# Altium footprint library RF Module.PcbLib: 29 footprints (part 1 of 2)
Each footprint in its own frame and in the unit in brackets; x right, y up, seen from the top. Pads: shape width x height; smd on the part's side, far side on the other; paste and mask are expansions set on the pad; w line width, h text height; cw(c..) or ccw(c..) is an arc to the next point about the centre after c.
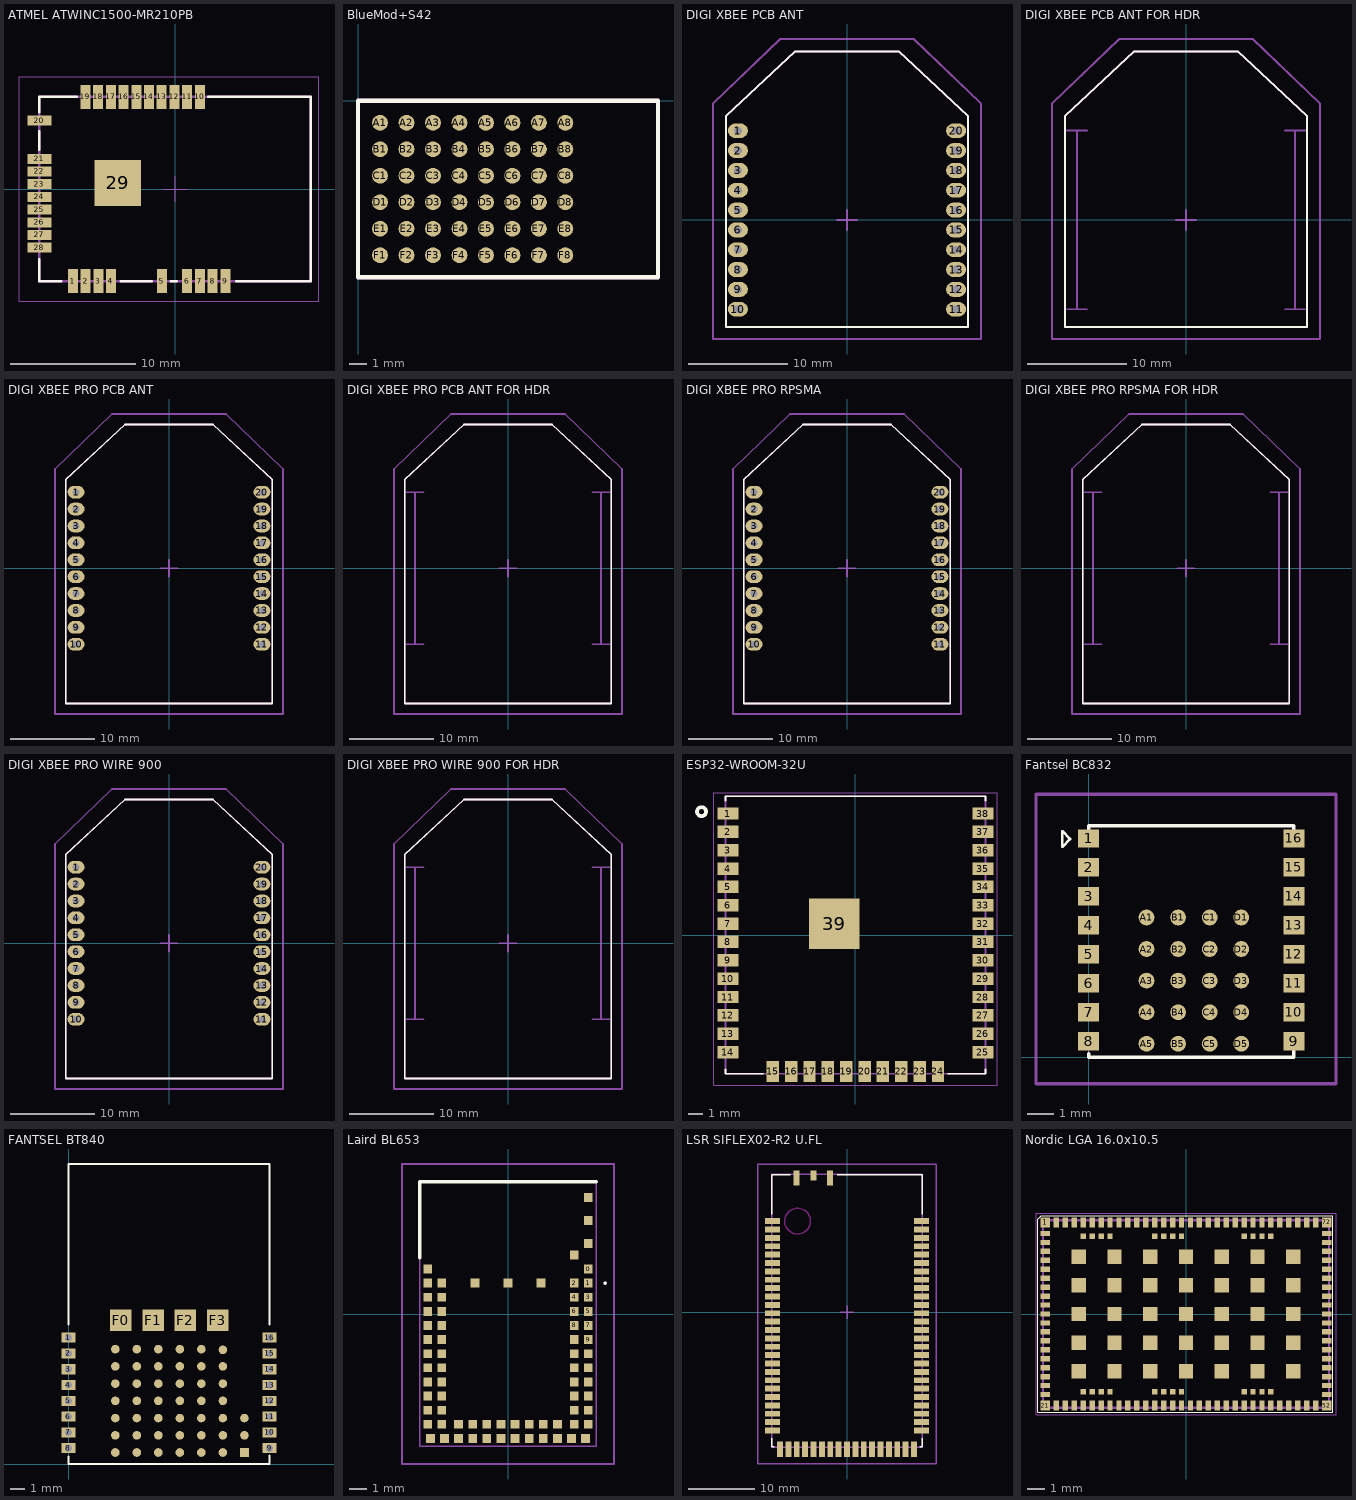
[diagram p0: the footprints below, top view; thin cyan lines are the x and y axes]

## ATMEL ATWINC1500-MR210PB [mm]
height 2.2
pads (29):
  rect 0.8x1.9 smd: 1(-8.19,-7.365) 2(-7.174,-7.365) 3(-6.158,-7.365) 4(-5.142,-7.365) 5(-1.078,-7.365) 6(0.954,-7.365) 7(1.97,-7.365) 8(2.986,-7.365) 9(4.002,-7.365) 10(1.964,7.365) 11(0.948,7.365) 12(-0.068,7.365) 13(-1.084,7.365) 14(-2.1,7.365) 15(-3.116,7.365) 16(-4.132,7.365) 17(-5.148,7.365) 18(-6.164,7.365) 19(-7.18,7.365)
  rect 1.9x0.8 smd: 20(-10.86,5.465) 21(-10.86,2.417) 22(-10.86,1.401) 23(-10.86,0.385) 24(-10.86,-0.631) 25(-10.86,-1.647) 26(-10.86,-2.663) 27(-10.86,-3.679) 28(-10.86,-4.695)
  rect 3.7x3.7 smd: 29(-4.59,0.485)
Top Overlay:
  lines w0.2: -10.86,-5.615 -10.86,-7.365 -9.11,-7.365 ; -10.86,3.135 -10.86,4.635 ; -10.86,6.135 -10.86,7.365 -7.86,7.365 ; -4.36,-7.365 -1.86,-7.365 ; -0.36,-7.365 0.14,-7.365 ; 2.64,7.365 10.86,7.365 10.86,-7.365 4.89,-7.365
Board:
  lines w0.2: -10.86,-7.365 -10.86,7.365 10.86,7.365 10.86,-7.365 -10.86,-7.365
Top Courtyard:
  lines w0.1: -1,0 1,0 ; 0,-1 0,1 ; -12.5,-9 11.5,-9 11.5,9 -12.5,9 -12.5,-9
3D body "ATWINC1500-MR210PB.STEP": height 2.2, standoff 0, extent -10.86,-7.365 10.86,7.365

## BlueMod+S42 [mm] "Bluetooth 4.2 Low Energy plug-and-play module"
height 2.8
pads (48):
  round 0.9 smd: A1(1.25,-1.25) A2(2.75,-1.25) A3(4.25,-1.25) A4(5.75,-1.25) A5(7.25,-1.25) A6(8.75,-1.25) A7(10.25,-1.25) A8(11.75,-1.25) B1(1.25,-2.75) B2(2.75,-2.75) B3(4.25,-2.75) B4(5.75,-2.75) B5(7.25,-2.75) B6(8.75,-2.75) B7(10.25,-2.75) B8(11.75,-2.75) C1(1.25,-4.25) C2(2.75,-4.25) C3(4.25,-4.25) C4(5.75,-4.25) C5(7.25,-4.25) C6(8.75,-4.25) C7(10.25,-4.25) C8(11.75,-4.25) D1(1.25,-5.75) D2(2.75,-5.75) D3(4.25,-5.75) D4(5.75,-5.75) D5(7.25,-5.75) D6(8.75,-5.75) D7(10.25,-5.75) D8(11.75,-5.75) E1(1.25,-7.25) E2(2.75,-7.25) E3(4.25,-7.25) E4(5.75,-7.25) E5(7.25,-7.25) E6(8.75,-7.25) E7(10.25,-7.25) E8(11.75,-7.25) F1(1.25,-8.75) F2(2.75,-8.75) F3(4.25,-8.75) F4(5.75,-8.75) F5(7.25,-8.75) F6(8.75,-8.75) F7(10.25,-8.75) F8(11.75,-8.75)
Top Overlay:
  lines w0.254: 0,-10 17,-10 17,0 0,0 0,-10
Board:
  lines w0.254: 0,-10 17,-10 17,0 0,0 0,-10
Notes (Assembly Notes):
  lines w0.254: 0,-10 17,-10 17,0 0,0 0,-10
3D body: height 0.3, standoff 0, extent 13.525,-3.375 14.15,-3.125
3D body: height 0.3, standoff 0, extent 13.25,-3.8 13.5,-3.125
3D body: height 1, standoff 0, extent 15.6,-9.4 16.6,-5.4
3D body: height 2.6, standoff 0, extent 0,-10 13.25,0

## DIGI XBEE PCB ANT [mm]
height 4
pads (20):
  oval 2x1.5 hole 0.8: 1(-11,9) 2(-11,7) 3(-11,5) 4(-11,3) 5(-11,1) 6(-11,-1) 7(-11,-3) 8(-11,-5) 9(-11,-7) 10(-11,-9) 11(11,-9) 12(11,-7) 13(11,-5) 14(11,-3) 15(11,-1) 16(11,1) 17(11,3) 18(11,5) 19(11,7) 20(11,9)
Top Overlay:
  lines w0.2: -12.2,-10.8 0,-10.8 12.2,-10.8 12.2,10.5 5.2,17 0,17 -5.2,17 -12.2,10.5 -12.2,-10.8
Board:
  lines w0.2: -12.2,-10.8 -12.2,10.5 -5.2,17 0,17 5.2,17 12.2,10.5 12.2,-10.8 0,-10.8 -12.2,-10.8
Top Courtyard:
  lines w0.2: -1,0 1,0 ; 0,-1 0,1 ; -13.5,-12 -13.5,11.75 -6.75,18.25 6.75,18.25 13.5,11.75 13.5,-12 -13.5,-12
3D body "XBee PCB Antenna.STEP": height 3.58, standoff -4.17, extent -12.192,-10.8 12.192,16.97

## DIGI XBEE PCB ANT FOR HDR [mm]
height 8.4
Top Overlay:
  lines w0.2: -12.2,-10.8 -12.2,10.5 -5.2,17 0,17 5.2,17 12.2,10.5 12.2,-10.8 0,-10.8 -12.2,-10.8
Board:
  lines w0.2: -12,-9 -11,-9 ; -12,9 -11,9 ; -10,-9 -11,-9 ; -10,9 -11,9 ; 10,-9 11,-9 ; 10,9 11,9 ; 12,-9 11,-9 ; 12,9 11,9 ; -11,-9 -11,9 ; 11,-9 11,9 ; -12.2,-10.8 0,-10.8 12.2,-10.8 12.2,10.5 5.2,17 0,17 -5.2,17 -12.2,10.5 -12.2,-10.8
Top Courtyard:
  lines w0.2: -1,0 1,0 ; 0,-1 0,1 ; -13.5,-12 13.5,-12 13.5,11.75 6.75,18.25 -6.75,18.25 -13.5,11.75 -13.5,-12
3D body "XBee PCB Antenna.STEP": height 7.98, standoff 0.23, extent -12.192,-10.8 12.192,16.97

## DIGI XBEE PRO PCB ANT [mm]
height 4
pads (20):
  oval 2x1.5 hole 0.8: 1(-11,9) 2(-11,7) 3(-11,5) 4(-11,3) 5(-11,1) 6(-11,-1) 7(-11,-3) 8(-11,-5) 9(-11,-7) 10(-11,-9) 11(11,-9) 12(11,-7) 13(11,-5) 14(11,-3) 15(11,-1) 16(11,1) 17(11,3) 18(11,5) 19(11,7) 20(11,9)
Top Overlay:
  lines w0.2: -12.2,-16 -12.2,10.5 -5.2,17 0,17 5.2,17 12.2,10.5 12.2,-16 -12.2,-16
Board:
  lines w0.2: -12.2,-16 12.2,-16 12.2,10.5 5.2,17 0,17 -5.2,17 -12.2,10.5 -12.2,-16
Top Courtyard:
  lines w0.2: -1,0 1,0 ; 0,-1 0,1 ; -13.5,-17.25 13.5,-17.25 13.5,11.75 6.75,18.25 -6.75,18.25 -13.5,11.75 -13.5,-17.25
3D body "XBee Pro PCB Antenna.STEP": height 3.58, standoff -4.17, extent -12.192,-15.97 12.192,16.97

## DIGI XBEE PRO PCB ANT FOR HDR [mm]
height 4
Top Overlay:
  lines w0.2: -12.2,-16 -12.2,10.5 -5.2,17 0,17 5.2,17 12.2,10.5 12.2,-16 -12.2,-16
Board:
  lines w0.2: -12,-9 -11,-9 ; -12,9 -11,9 ; -10,-9 -11,-9 ; -10,9 -11,9 ; 10,-9 11,-9 ; 10,9 11,9 ; 12,-9 11,-9 ; 12,9 11,9 ; -11,-9 -11,9 ; 11,-9 11,9 ; -12.2,-16 12.2,-16 12.2,10.5 5.2,17 0,17 -5.2,17 -12.2,10.5 -12.2,-16
Top Courtyard:
  lines w0.2: -1,0 1,0 ; 0,-1 0,1 ; -13.5,-17.25 13.5,-17.25 13.5,11.75 6.75,18.25 -6.75,18.25 -13.5,11.75 -13.5,-17.25
3D body "XBee Pro PCB Antenna.STEP": height 3.58, standoff -4.17, extent -12.192,-15.97 12.192,16.97

## DIGI XBEE PRO RPSMA [mm]
height 4
pads (20):
  oval 2x1.5 hole 0.8: 1(-11,9) 2(-11,7) 3(-11,5) 4(-11,3) 5(-11,1) 6(-11,-1) 7(-11,-3) 8(-11,-5) 9(-11,-7) 10(-11,-9) 11(11,-9) 12(11,-7) 13(11,-5) 14(11,-3) 15(11,-1) 16(11,1) 17(11,3) 18(11,5) 19(11,7) 20(11,9)
Top Overlay:
  lines w0.2: -12.2,-16 -12.2,10.5 -5.2,17 0,17 5.2,17 12.2,10.5 12.2,-16 -12.2,-16
Board:
  lines w0.2: -12.2,-16 12.2,-16 12.2,10.5 5.2,17 0,17 -5.2,17 -12.2,10.5 -12.2,-16
Top Courtyard:
  lines w0.2: -1,0 1,0 ; 0,-1 0,1 ; -13.5,-17.25 13.5,-17.25 13.5,11.75 6.75,18.25 -6.75,18.25 -13.5,11.75 -13.5,-17.25
3D body "XBee Pro wRPSMA.STEP": height 7.27, standoff -4.17, extent -12.192,-15.97 12.192,29.97

## DIGI XBEE PRO RPSMA FOR HDR [mm]
height 12.4
Top Overlay:
  lines w0.2: -12.2,-16 12.2,-16 12.2,10.5 5.2,17 0,17 -5.2,17 -12.2,10.5 -12.2,-16
Board:
  lines w0.2: -12,-9 -11,-9 ; -12,9 -11,9 ; -10,-9 -11,-9 ; -10,9 -11,9 ; 10,-9 11,-9 ; 10,9 11,9 ; 12,-9 11,-9 ; 12,9 11,9 ; -11,-9 -11,9 ; 11,-9 11,9 ; -12.2,-16 -12.2,10.5 -5.2,17 0,17 5.2,17 12.2,10.5 12.2,-16 -12.2,-16
Top Courtyard:
  lines w0.2: -1,0 1,0 ; 0,-1 0,1 ; -13.5,-17.25 -13.5,11.75 -6.75,18.25 6.75,18.25 13.5,11.75 13.5,-17.25 -13.5,-17.25
3D body "XBee Pro wRPSMA.STEP": height 11.67, standoff 0.23, extent -12.192,-15.97 12.192,29.97

## DIGI XBEE PRO WIRE 900 [mm]
height 4
pads (20):
  oval 2x1.5 hole 0.8: 1(-11,9) 2(-11,7) 3(-11,5) 4(-11,3) 5(-11,1) 6(-11,-1) 7(-11,-3) 8(-11,-5) 9(-11,-7) 10(-11,-9) 11(11,-9) 12(11,-7) 13(11,-5) 14(11,-3) 15(11,-1) 16(11,1) 17(11,3) 18(11,5) 19(11,7) 20(11,9)
Top Overlay:
  lines w0.2: -12.2,-16 -12.2,10.5 -5.2,17 0,17 5.2,17 12.2,10.5 12.2,-16 -12.2,-16
Board:
  lines w0.2: -12.2,-16 12.2,-16 12.2,10.5 5.2,17 0,17 -5.2,17 -12.2,10.5 -12.2,-16
Top Courtyard:
  lines w0.2: -1,0 1,0 ; 0,-1 0,1 ; -13.5,-17.25 13.5,-17.25 13.5,11.75 6.75,18.25 -6.75,18.25 -13.5,11.75 -13.5,-17.25
3D body "XBee Pro Wire 900.STEP": height 77.88, standoff -4.17, extent -12.192,-15.97 12.192,16.97

## DIGI XBEE PRO WIRE 900 FOR HDR [mm]
height 8.4
Top Overlay:
  lines w0.2: -12.2,-16 12.2,-16 12.2,10.5 5.2,17 0,17 -5.2,17 -12.2,10.5 -12.2,-16
Board:
  lines w0.2: -12,-9 -11,-9 ; -12,9 -11,9 ; -10,-9 -11,-9 ; -10,9 -11,9 ; 10,-9 11,-9 ; 10,9 11,9 ; 12,-9 11,-9 ; 12,9 11,9 ; -11,-9 -11,9 ; 11,-9 11,9 ; -12.2,-16 -12.2,10.5 -5.2,17 0,17 5.2,17 12.2,10.5 12.2,-16 -12.2,-16
Top Courtyard:
  lines w0.2: -1,0 1,0 ; 0,-1 0,1 ; -13.5,-17.25 -13.5,11.75 -6.75,18.25 6.75,18.25 13.5,11.75 13.5,-17.25 -13.5,-17.25
3D body "XBee Pro Wire 900.STEP": height 82.28, standoff 0.23, extent -12.192,-15.97 12.192,16.97

## ESP32-WROOM-32U [mm]
pads (39):
  rect 1.45x0.86 smd: 1(-8.83,8.41) 2(-8.83,7.14) 3(-8.83,5.87) 4(-8.83,4.6) 5(-8.83,3.33) 6(-8.83,2.06) 7(-8.83,0.79) 8(-8.83,-0.48) 9(-8.83,-1.75) 10(-8.83,-3.02) 11(-8.83,-4.29) 12(-8.83,-5.56) 13(-8.83,-6.83) 14(-8.83,-8.1) 25(8.83,-8.1) 26(8.83,-6.83) 27(8.83,-5.56) 28(8.83,-4.29) 29(8.83,-3.02) 30(8.83,-1.75) 31(8.83,-0.48) 32(8.83,0.79) 33(8.83,2.06) 34(8.83,3.33) 35(8.83,4.6) 36(8.83,5.87) 37(8.83,7.14) 38(8.83,8.41)
  rect 0.86x1.45 smd: 15(-5.715,-9.43) 16(-4.445,-9.43) 17(-3.175,-9.43) 18(-1.905,-9.43) 19(-0.635,-9.43) 20(0.635,-9.43) 21(1.905,-9.43) 22(3.175,-9.43) 23(4.445,-9.43) 24(5.715,-9.43)
  rect 3.5x3.5 smd: 39(-1.46,0.77)
Top Overlay:
  circle w0.254: c-10.65,8.54 r0.312
  lines w0.127: -9,-9.3 -9,-9.6 -6.4,-9.6 ; -9,9.3 -9,9.6 9,9.6 9,9.3 ; 6.4,-9.6 9,-9.6 9,-9.3
Mechanical 4:
  lines w0.127: -9,-9.6 9,-9.6 ; -9,-9.6 -9,9.6 ; -9,-9.6 9,-9.6 ; -9,-9.6 -9,9.6 ; -9,9.6 9,9.6 ; -9,9.6 9,9.6 ; 9,-9.6 9,9.6 ; 9,-9.6 9,9.6
Bottom Courtyard:
  lines w0.05: -9.8,-10.4 9.8,-10.4 9.8,9.85 -9.8,9.85 -9.8,-10.4
3D body "ESP32-WROOM-32U.STEP": height 3.3, standoff 0, extent -9,-9.6 9,9.6

## Fantsel BC832 [mil] "Fantsel BLE Micro Module Ver 2.0"
height 55.12
pads (36):
  rect 31.5x27.56 smd: 1(0,327.56) 2(0,284.25) 3(0,240.94) 4(0,197.64) 5(0,154.33) 6(0,111.02) 7(0,67.72) 8(0,24.41) 9(307.09,24.41) 10(307.09,67.72) 11(307.09,111.02) 12(307.09,154.33) 13(307.09,197.64) 14(307.09,240.94) 15(307.09,284.25) 16(307.09,327.56)
  rrect100% 23.62x23.62 smd: A1(86.61,209.41) A2(86.61,162.17) A3(86.61,114.92) A4(86.61,67.68) A5(86.61,20.43) B1(133.86,209.41) B2(133.86,162.17) B3(133.86,114.92) B4(133.86,67.68) B5(133.86,20.43) C1(181.1,209.41) C2(181.1,162.17) C3(181.1,114.92) C4(181.1,67.68) C5(181.1,20.43) D1(228.35,209.41) D2(228.35,162.17) D3(228.35,114.92) D4(228.35,67.68) D5(228.35,20.43)
Top Overlay:
  lines w3.94: -27.56,326.77 -27.56,326.77 ; -27.56,326.77 -39.37,338.58 -39.37,314.96 -27.56,326.77
  lines w5: 0,5.91 0,0 307.09,0 307.09,10.55 ; 0,341.26 0,346.46 307.09,346.46 307.09,341.26
Top Courtyard:
  lines w0.04: 0,5.91 0,10
  lines w3.94: -78.74,-39.37 -78.74,393.7
  lines w5: -78.74,-39.37 370.08,-39.37 370.08,393.7 -78.74,393.7
3D body "FANTSEL BC832.stp": height 43.31, standoff -11.81, extent 7.88,0.01 314.96,346.46

## FANTSEL BT840 [mm]
pads (65):
  rect 1x0.7 / inner rect 0.7x0.7 / far side rect 1.5x0.7 hole 0.5: 1(-0.018,8.801) 2(-0.018,7.701) 3(-0.018,6.601) 4(-0.018,5.501) 5(-0.018,4.401) 6(-0.018,3.301) 7(-0.018,2.201) 8(-0.018,1.101) 9(13.992,1.101) 10(13.992,2.201) 11(13.992,3.301) 12(13.992,4.401) 13(13.992,5.501) 14(13.992,6.601) 15(13.992,7.701) 16(13.992,8.801)
  round 0.6 smd: A0(4.745,8.001) A1(4.745,6.801) A2(4.745,5.601) A3(4.745,4.401) A4(4.745,3.201) A5(4.745,2.001) A6(4.745,0.801) B0(6.245,8.001) B1(6.245,6.801) B2(6.245,5.601) B3(6.245,4.401) B4(6.245,3.201) B5(6.245,2.001) B6(6.245,0.801) C0(7.745,8.001) C1(7.745,6.801) C2(7.745,5.601) C3(7.745,4.401) C4(7.745,3.201) C5(7.745,2.001) C6(7.745,0.801) D0(9.245,8.001) D1(9.245,6.801) D2(9.245,5.601) D3(9.245,4.401) D4(9.245,3.201) D5(9.245,2.001) D6(9.245,0.801) E0(10.745,7.953) E1(10.745,6.801) E2(10.745,5.601) E3(10.745,4.401) E4(10.745,3.201) E5(10.745,2.001) E6(10.745,0.801) F4(12.245,3.201) F5(12.245,2.001) Z0(3.245,8.001) Z1(3.245,6.801) Z2(3.245,5.601) Z3(3.245,4.401) Z4(3.245,3.201) Z5(3.245,2.001) Z6(3.245,0.801)
  rect 1.5x1.5 smd: F0(3.625,10) F1(5.875,10) F2(8.125,10) F3(10.375,10)
  rect 0.6x0.6 smd: F6(12.245,0.801)
Top Overlay:
  lines w0.152: -0.01,0.004 -0.01,0.522 ; -0.008,0.001 13.992,0.001 ; -0.005,9.725 -0.005,20.901 13.992,20.901 13.992,9.725 ; 13.995,0.011 13.995,0.591
3D body "FANTSEL BT840.stp": height 2.02, standoff 0.02, extent 0,0 14,16

## Laird BL653 [mm] "Laird BL653"
pads (73):
  rect 0.5x0.5 smd: 0(4.55,2.55) 1(4.55,1.75) 2(3.75,1.75) 3(4.55,0.95) 4(3.75,0.95) 5(4.55,0.15) 6(3.75,0.15) 7(4.55,-0.65) 8(3.75,-0.65) 9(4.55,-1.45) 10(3.75,-1.45) 11(4.55,-2.25) 12(3.75,-2.25) 13(4.55,-3.05) 14(3.75,-3.05) 15(4.55,-3.85) 16(3.75,-3.85) 17(4.55,-4.65) 18(3.75,-4.65) 19(4.55,-5.45) 20(3.75,-5.45) 21(4.55,-6.25) 22(3.75,-6.25) 23(4.4,-7.05) 24(3.6,-7.05) 25(2.8,-7.05) 26(2.8,-6.25) 27(2,-7.05) 28(2,-6.25) 29(1.2,-7.05) 30(1.2,-6.25) 31(0.4,-7.05) 32(0.4,-6.25) 33(-0.4,-7.05) 34(-0.4,-6.25) 35(-1.2,-7.05) 36(-1.2,-6.25) 37(-2,-7.05) 38(-2,-6.25) 39(-2.8,-7.05) 40(-2.8,-6.25) 41(-3.6,-7.05) 42(-4.4,-7.05) 43(-4.55,-6.25) 44(-3.75,-6.25) 45(-4.55,-5.45) 46(-3.75,-5.45) 47(-4.55,-4.65) 48(-3.75,-4.65) 49(-4.55,-3.85) 50(-3.75,-3.85) 51(-4.55,-3.05) 52(-3.75,-3.05) 53(-4.55,-2.25) 54(-3.75,-2.25) 55(-4.55,-1.45) 56(-3.75,-1.45) 57(-4.55,-0.65) 58(-3.75,-0.65) 59(-4.55,0.15) 60(-3.75,0.15) 61(-4.55,0.95) 62(-3.75,0.95) 63(-4.55,1.75) 64(-3.75,1.75) 65(-4.55,2.55) 66(4.55,4) 67(4.55,5.3) 68(4.55,6.6) 69(-1.875,1.75) 70(0,1.75) 71(1.875,1.75) 72(3.75,3.35)
Top Overlay:
  lines w0.1: 5.5,1.7 cw(c5.5,1.75) 5.5,1.8 cw(c5.5,1.75) 5.5,1.7
  lines w0.2: -5,3.2 -5,7.5 5,7.5
Top Component Outline:
  lines w0.1: -5,-7.5 5,-7.5 5,7.5 -5,7.5 -5,-7.5
Top Courtyard:
  lines w0.1: -6,-8.5 6,-8.5 6,8.5 -6,8.5 -6,-8.5
3D body "lARDI BL653 453-00041.STEP": height 2.13, standoff -0.01, extent -5,-7.5 5,7.5

## LSR SIFLEX02-R2 U.FL [mil]
height 200.79
pads (72):
  rect 90x35 smd: 1(-445,544.51) 2(-445,494.51) 3(-445,444.51) 4(-445,394.51) 5(-445,344.51) 6(-445,294.51) 7(-445,244.51) 8(-445,194.51) 9(-445,144.51) 10(-445,94.51) 11(-445,44.51) 12(-445,-5.49) 13(-445,-55.49) 14(-445,-105.49) 15(-445,-155.49) 16(-445,-205.49) 17(-445,-255.49) 18(-445,-305.49) 19(-445,-355.49) 20(-445,-405.49) 21(-445,-455.49) 22(-445,-505.49) 23(-445,-555.49) 24(-445,-605.49) 25(-445,-655.49) 26(-445,-705.49) 44(445,-705.49) 45(445,-655.49) 46(445,-605.49) 47(445,-555.49) 48(445,-505.49) 49(445,-455.49) 50(445,-405.49) 51(445,-355.49) 52(445,-305.49) 53(445,-255.49) 54(445,-205.49) 55(445,-155.49) 56(445,-105.49) 57(445,-55.49) 58(445,-5.49) 59(445,44.51) 60(445,94.51) 61(445,144.51) 62(445,194.51) 63(445,244.51) 64(445,294.51) 65(445,344.51) 66(445,394.51) 67(445,444.51) 68(445,494.51) 69(445,544.51)
  rect 35x90 smd: 27(-400,-817.49) 28(-350,-817.49) 29(-300,-817.49) 30(-250,-817.49) 31(-200,-817.49) 32(-150,-817.49) 33(-100,-817.49) 34(-50,-817.49) 35(0,-817.49) 36(50,-817.49) 37(100,-817.49) 38(150,-817.49) 39(200,-817.49) 40(250,-817.49) 41(300,-817.49) 42(350,-817.49) 43(400,-817.49) 70(-100.5,802.51) 72(-300.5,802.49)
  rect 35x60 smd: 71(-200.5,817.49)
Top Overlay:
  lines w7.87: -448.82,-752.51 -448.82,-803.69 -433.07,-803.69 ; -448.82,586.07 -448.82,822.29 -338.58,822.29 ; -59.06,822.29 448.82,822.29 448.82,586.07 ; 433.07,-803.69 448.82,-803.69 448.82,-752.51
Keep-Out Layer:
  circle w7.87: c-295,544.51 r76.87
Board:
  lines w7.87: -450,-804.71 -450,825.29 450,825.29 450,-804.71 -450,-804.71
Top Courtyard:
  lines w7.87: -39.37,0 39.37,0 ; 0,-39.37 0,39.37 ; -531.5,-905.51 -531.5,885.83 531.5,885.83 531.5,-905.51 -531.5,-905.51
3D body "LSR SIFlex02-R2 450-0016-R1.STEP": height 176.7, standoff -0.5, extent -450,-804.71 450,825.29

## Nordic LGA 16.0x10.5 [mm]
height 1.1
pads (161):
  rect 0.54x0.54 smd: 1(-7.87,5.12) 21(-7.87,-5.12) 52(7.87,-5.12) 72(7.87,5.12)
  rect 0.54x0.3 smd: 2(-7.87,4.5) 3(-7.87,4) 4(-7.87,3.5) 5(-7.87,3) 6(-7.87,2.5) 7(-7.87,2) 8(-7.87,1.5) 9(-7.87,1) 10(-7.87,0.5) 11(-7.87,0) 12(-7.87,-0.5) 13(-7.87,-1) 14(-7.87,-1.5) 15(-7.87,-2) 16(-7.87,-2.5) 17(-7.87,-3) 18(-7.87,-3.5) 19(-7.87,-4) 20(-7.87,-4.5) 53(7.87,-4.5) 54(7.87,-4) 55(7.87,-3.5) 56(7.87,-3) 57(7.87,-2.5) 58(7.87,-2) 59(7.87,-1.5) 60(7.87,-1) 61(7.87,-0.5) 62(7.87,0) 63(7.87,0.5) 64(7.87,1) 65(7.87,1.5) 66(7.87,2) 67(7.87,2.5) 68(7.87,3) 69(7.87,3.5) 70(7.87,4) 71(7.87,4.5)
  rect 0.3x0.54 smd: 22(-7.25,-5.12) 23(-6.75,-5.12) 24(-6.25,-5.12) 25(-5.75,-5.12) 26(-5.25,-5.12) 27(-4.75,-5.12) 28(-4.25,-5.12) 29(-3.75,-5.12) 30(-3.25,-5.12) 31(-2.75,-5.12) 32(-2.25,-5.12) 33(-1.75,-5.12) 34(-1.25,-5.12) 35(-0.75,-5.12) 36(-0.25,-5.12) 37(0.25,-5.12) 38(0.75,-5.12) 39(1.25,-5.12) 40(1.75,-5.12) 41(2.25,-5.12) 42(2.75,-5.12) 43(3.25,-5.12) 44(3.75,-5.12) 45(4.25,-5.12) 46(4.75,-5.12) 47(5.25,-5.12) 48(5.75,-5.12) 49(6.25,-5.12) 50(6.75,-5.12) 51(7.25,-5.12) 73(7.25,5.12) 74(6.75,5.12) 75(6.25,5.12) 76(5.75,5.12) 77(5.25,5.12) 78(4.75,5.12) 79(4.25,5.12) 80(3.75,5.12) 81(3.25,5.12) 82(2.75,5.12) 83(2.25,5.12) 84(1.75,5.12) 85(1.25,5.12) 86(0.75,5.12) 87(0.25,5.12) 88(-0.25,5.12) 89(-0.75,5.12) 90(-1.25,5.12) 91(-1.75,5.12) 92(-2.25,5.12) 93(-2.75,5.12) 94(-3.25,5.12) 95(-3.75,5.12) 96(-4.25,5.12) 97(-4.75,5.12) 98(-5.25,5.12) 99(-5.75,5.12) 100(-6.25,5.12) 101(-6.75,5.12) 102(-7.25,5.12)
  rect 0.8x0.8 smd: 103_1(-6,3.2) 103_2(-4,3.2) 103_3(-2,3.2) 103_4(0,3.2) 103_5(2,3.2) 103_6(4,3.2) 103_7(6,3.2) 103_8(-6,1.6) 103_9(-4,1.6) 103_10(-2,1.6) 103_11(0,1.6) 103_12(2,1.6) 103_13(4,1.6) 103_14(6,1.6) 103_15(-6,0) 103_16(-4,0) 103_17(-2,0) 103_18(0,0) 103_19(2,0) 103_20(4,0) 103_21(6,0) 103_22(-6,-1.6) 103_23(-4,-1.6) 103_24(-2,-1.6) 103_25(0,-1.6) 103_26(2,-1.6) 103_27(4,-1.6) 103_28(6,-1.6) 103_29(-6,-3.2) 103_30(-4,-3.2) 103_31(-2,-3.2) 103_32(0,-3.2) 103_33(2,-3.2) 103_34(4,-3.2) 103_35(6,-3.2)
  rect 0.3x0.3 smd: 104(-5.75,-4.35) 105(-5.25,-4.35) 106(-4.75,-4.35) 107(-4.25,-4.35) 108(-1.75,-4.35) 109(-1.25,-4.35) 110(-0.75,-4.35) 111(-0.25,-4.35) 112(3.25,-4.35) 113(3.75,-4.35) 114(4.25,-4.35) 115(4.75,-4.35) 116(4.75,4.35) 117(4.25,4.35) 118(3.75,4.35) 119(3.25,4.35) 120(-0.25,4.35) 121(-0.75,4.35) 122(-1.25,4.35) 123(-1.75,4.35) 124(-4.25,4.35) 125(-4.75,4.35) 126(-5.25,4.35) 127(-5.75,4.35)
Top Overlay:
  lines w0.05: -8.3,-5.5 -8.3,5.3 -8.1,5.5 8.2,5.5 8.2,-5.5 -8.3,-5.5
Top Component Outline:
  lines w0.127: -8,-5.25 -8,5.25 8,5.25 8,-5.25 -8,-5.25
Top Courtyard:
  lines w0.05: -8.39,-5.64 -8.39,5.64 8.39,5.64 8.39,-5.64 -8.39,-5.64
3D body "step_temp.STEP": height 1.1, standoff 0, extent -8,-5.25 8,5.25